# Altium footprint library PCB_Module.PcbLib: 31 footprints (part 1 of 2)
Each footprint in its own frame and in the unit in brackets; x right, y up, seen from the top. Pads: shape width x height; smd on the part's side, far side on the other; paste and mask are expansions set on the pad; w line width, h text height; cw(c..) or ccw(c..) is an arc to the next point about the centre after c.
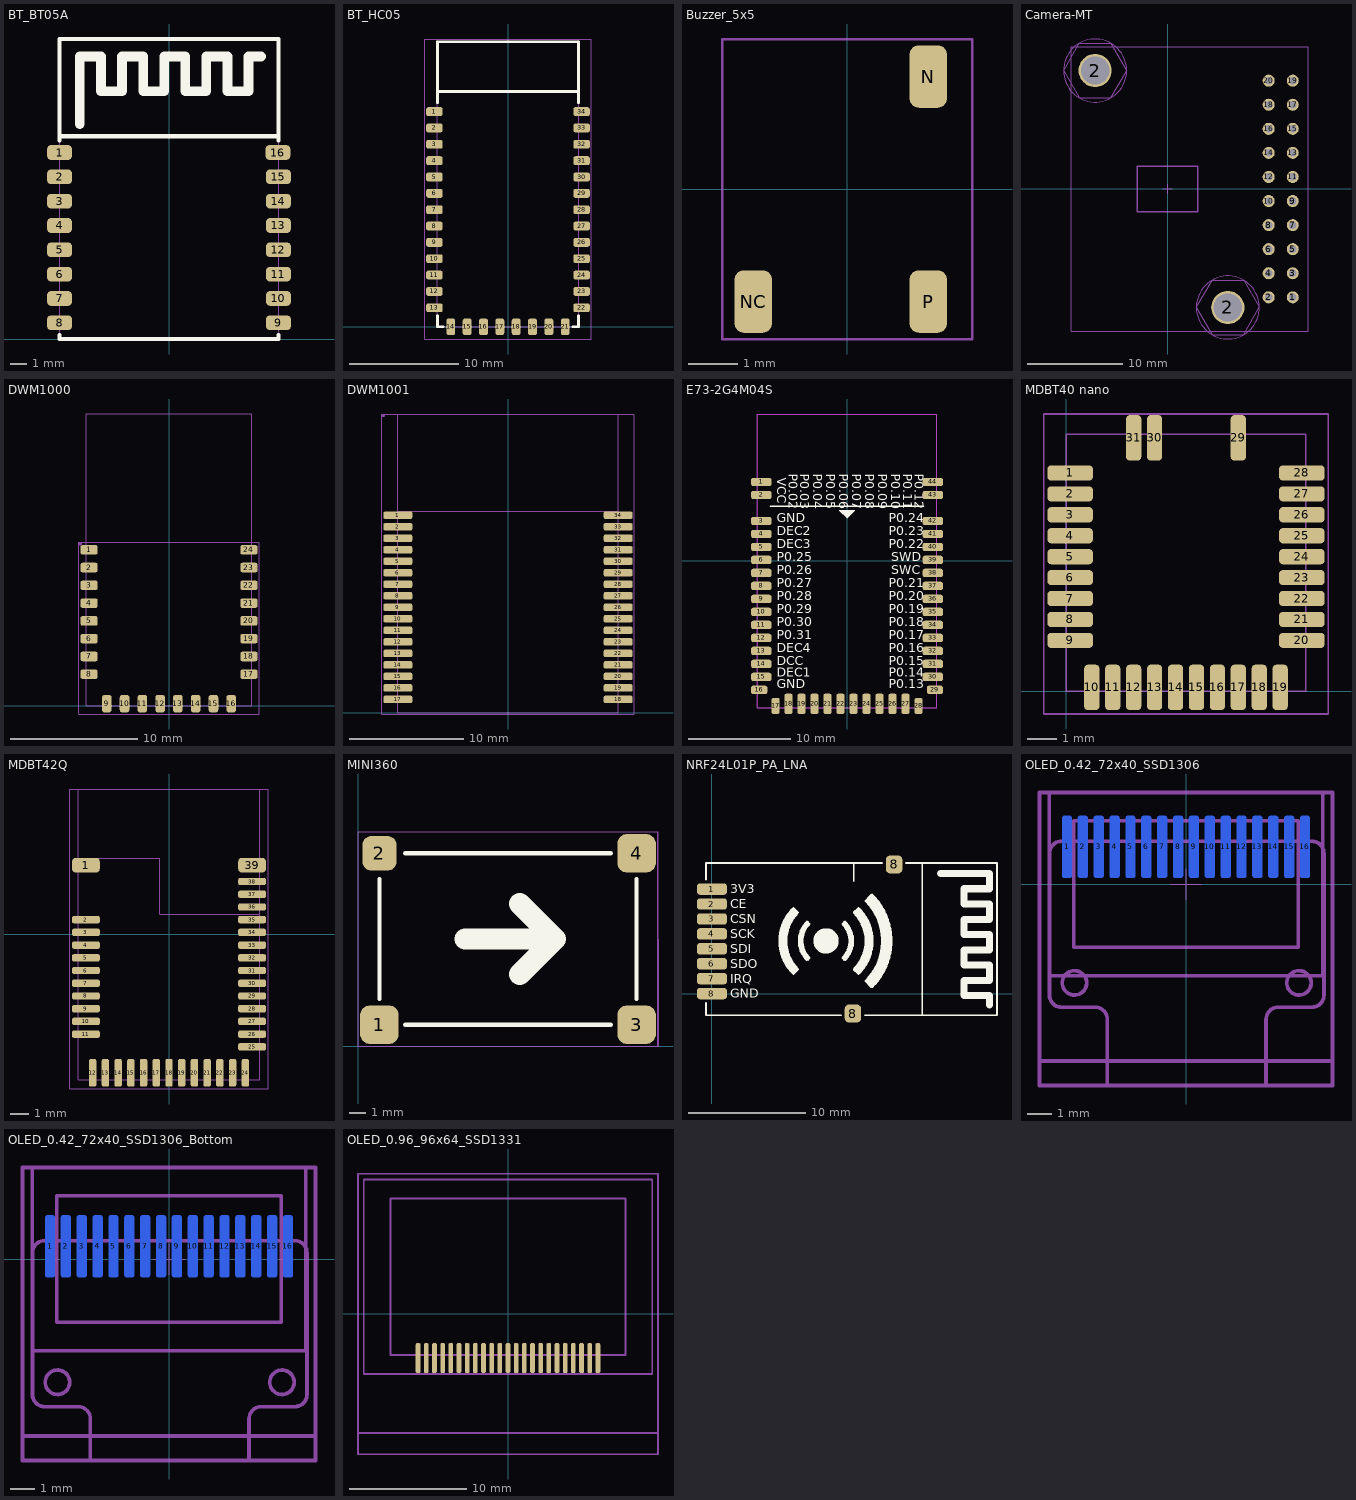
[diagram p0: the footprints below, top view; thin cyan lines are the x and y axes]

## BT_BT05A [mm]
pads (16):
  rrect50% 1.524x0.9 smd: 1(-6.754,11.5) 2(-6.754,10) 3(-6.754,8.5) 4(-6.754,7) 5(-6.754,5.5) 6(-6.754,4) 7(-6.754,2.5) 8(-6.754,1) 9(6.746,1) 10(6.746,2.5) 11(6.746,4) 12(6.746,5.5) 13(6.746,7) 14(6.746,8.5) 15(6.746,10) 16(6.712,11.5)
Top Overlay:
  lines w0.254: -6.75,0.25 -6.75,0 6.75,0 6.75,0.25 ; -6.75,12.25 -6.75,12.5 ; 6.75,12.25 6.75,12.5 ; -6.75,12.5 -6.75,18.5 6.75,18.5 6.75,12.5 ; -6.75,12.5 6.75,12.5
  lines w0.6: -5.5,13.25 -5.5,17.426 -4.2,17.426 -4.2,15.282 -2.9,15.282 -2.9,17.426 -1.6,17.426 -1.6,15.282 -0.3,15.282 -0.3,17.426 1,17.426 1,15.282 2.3,15.282 2.3,17.426 3.6,17.426 3.6,15.282 4.9,15.282 4.9,17.426 5.676,17.426
Mechanical 13:
  lines w0.051: -6.75,12.5 6.75,12.5 ; -6.75,0 6.75,0 6.75,18.5 -6.75,18.5 -6.75,0
T-Component:
  lines w0.051: -6.75,0 6.75,0 6.75,18.5 -6.75,18.5 -6.75,0
  text ".Designator" at -0.873,6.885 h1.27

## BT_HC05 [mil]
pads (34):
  rrect50% 60x32 smd: 1(-265.91,777.56) 2(-265.91,718.5) 3(-265.91,659.45) 4(-265.91,600.39) 5(-265.91,541.34) 6(-265.91,482.28) 7(-265.91,423.23) 8(-265.91,364.17) 9(-265.91,305.12) 10(-265.91,246.06) 11(-265.91,187.01) 12(-265.91,127.95) 13(-265.91,68.9) 22(265.91,68.9) 23(265.91,127.95) 24(265.91,187.01) 25(265.91,246.06) 26(265.91,305.12) 27(265.91,364.17) 28(265.91,423.23) 29(265.91,482.28) 30(265.91,541.34) 31(265.91,600.39) 32(265.91,659.45) 33(265.91,718.5) 34(265.91,777.56)
  rrect50% 32x60 smd: 14(-206.69,0) 15(-147.64,0) 16(-88.58,0) 17(-29.53,0) 18(29.53,0) 19(88.58,0) 20(147.64,0) 21(206.69,0)
Top Overlay:
  lines w10: -255,40 -255,0 -235,0 ; -255,810 -255,850 ; 235,0 255,0 255,40 ; 255,810 255,850 ; -255,850 -255,1030 255,1030 255,850 ; -255,850 255,850
Mechanical 13:
  lines w2: -255.91,850.39 255.91,850.39 ; -255.91,0 255.91,0 255.91,1039.37 -255.91,1039.37 -255.91,0
T-Component:
  lines w2: -300,-44 300,-44 300,1040 -300,1040 -300,-44
  text ".Designator" at -34.37,396.06 h50
3D body "User Library-Bluetooth HC-06_.STEP": height 92.52, standoff 0, extent -275.98,0 275.98,1102.76

## Buzzer_5x5 [mil]
pads (3):
  rrect50% 30x50 smd: N(65,90) NC(-75,-90) P(65,-90)
T-Component:
  lines w2: -100,-120 -100,120 100,120 100,-120 -100,-120
  text ".Designator" at -34.37,-3.94 h50
3D body "css-0575b-smt.stp": height 106.3, standoff 0, extent -98.44,-98.43 98.41,98.43

## Camera-MT [mil]
pads (22):
  round 50 hole 31: 1(520,-450) 2(420,-450) 3(520,-350) 4(420,-350) 5(520,-250) 6(420,-250) 7(520,-150) 8(420,-150) 9(520,-50) 10(420,-50) 11(520,50) 12(420,50) 13(520,150) 14(420,150) 15(520,250) 16(420,250) 17(520,350) 18(420,350) 19(520,450) 20(420,450)
  round 137.8 hole 118.11 mask+0: 2(-300.94,492.13) 2(250.24,-492.13)
Mechanical 13:
  circle w2: c-300.94,492.13 r130.98
  circle w2: c250.24,-492.13 r130.98
  lines w2: -19.69,0 19.68,0 ; 0,-19.69 0,19.68 ; -431.92,492.13 -366.43,605.55 -235.46,605.55 -169.97,492.12 -235.46,378.7 -366.43,378.7 -431.92,492.13 ; -399.37,-590.55 -399.37,590.55 584.88,590.55 584.88,-590.55 -399.37,-590.55 ; 119.26,-492.13 184.75,-378.7 315.72,-378.7 381.21,-492.13 315.72,-605.56 184.75,-605.56 119.26,-492.13
  lines w6: -126,-94 126,-94 126,94 -126,94 -126,-94
T-Component:
  text ".Designator" at -34.37,-3.94 h50
B-Component:
  lines w1: 510,-450 530,-450 ; 510,-350 530,-350 ; 510,-250 530,-250 ; 510,-150 530,-150 ; 510,-50 530,-50 ; 510,50 530,50 ; 510,150 530,150 ; 510,250 530,250 ; 510,350 530,350 ; 510,450 530,450 ; 520,-460 520,-440 ; 520,-360 520,-340 ; 520,-260 520,-240 ; 520,-160 520,-140 ; 520,-60 520,-40 ; 520,40 520,60 ; 520,140 520,160 ; 520,240 520,260 ; 520,340 520,360 ; 520,440 520,460
3D body "Camera-MT__Pcb.step": height 528.82, standoff 114.65, extent -399.36,-590.55 584.89,590.55
3D body "female_header_a-bl254-dg-g04d.stp": height 334.65, standoff -125.98, extent 371.57,-4.91 568.42,204.93
3D body "female_header_a-bl254-dg-g06d.stp": height 334.65, standoff -125.98, extent 371.57,195.08 568.42,504.93
3D body "female_header_a-bl254-dg-g06d.stp": height 334.65, standoff -125.98, extent 371.57,-304.92 568.42,4.93
3D body "female_header_a-bl254-dg-g04d.stp": height 334.65, standoff -125.98, extent 371.57,-504.91 568.42,-295.07

## DWM1000 [mil]
pads (24):
  rrect50% 54x30 smd: 1(-248,484.25) 2(-248,429.13) 3(-248,374.02) 4(-248,318.9) 5(-248,263.78) 6(-248,208.66) 7(-248,153.54) 8(-248,98.43) 17(248,98.43) 18(248,153.54) 19(248,208.66) 20(248,263.78) 21(248,318.9) 22(248,374.02) 23(248,429.13) 24(248,484.25)
  rrect50% 30x54 smd: 9(-192.91,7) 10(-137.8,7) 11(-82.68,7) 12(-27.56,7) 13(27.56,7) 14(82.68,7) 15(137.8,7) 16(192.91,7)
Mechanical 13:
  lines w1.97: -255.91,905.51 -255.91,0 255.91,0 255.91,905.51
  lines w2: -255.91,905.51 255.91,905.51
T-Component:
  region: -280,508 -270,508 -270,503 -270,502.01 -270.76,500.17 -272.17,498.76 -274.01,498 -275,498 -280,498
  lines w2: -280,-25 280,-25 280,508 -280,508 -280,-25
  text ".Designator" at -39.37,246.06 h50
3D body "DWM1000 Module.STEP": height 114.17, standoff -0.39, extent -255.9,0 255.9,905.51

## DWM1001 [mm]
pads (34):
  rrect50% 2.54x0.66 smd: 1(-9.65,17.294) 2(-9.65,16.285) 3(-9.65,15.276) 4(-9.65,14.267) 5(-9.65,13.258) 6(-9.65,12.249) 7(-9.65,11.24) 8(-9.65,10.231) 9(-9.65,9.222) 10(-9.65,8.213) 11(-9.65,7.204) 12(-9.65,6.195) 13(-9.65,5.186) 14(-9.65,4.177) 15(-9.65,3.168) 16(-9.65,2.159) 17(-9.65,1.15) 18(9.65,1.15) 19(9.65,2.159) 20(9.65,3.168) 21(9.65,4.177) 22(9.65,5.186) 23(9.65,6.195) 24(9.65,7.204) 25(9.65,8.213) 26(9.65,9.222) 27(9.65,10.231) 28(9.65,11.24) 29(9.65,12.249) 30(9.65,13.258) 31(9.65,14.267) 32(9.65,15.276) 33(9.65,16.285) 34(9.65,17.294)
Mechanical 13:
  lines w0.051: -9.65,17.653 9.65,17.653 ; -9.65,0 -9.65,26.13 9.65,26.13 9.65,0 -9.65,0
T-Component:
  region: -11.049,26.162 -10.795,26.162 -10.795,26.035 -10.795,26.01 -10.814,25.963 -10.85,25.927 -10.897,25.908 -10.922,25.908 -11.049,25.908
  lines w0.051: -11.049,-0.127 11.049,-0.127 11.049,26.162 -11.049,26.162 -11.049,-0.127
  text ".Designator" at -0.746,8.79 h1.27

## E73-2G4M04S [mil]
pads (44):
  rrect50% 78x32 smd: 1(-330,303.74) 2(-330,253.74) 3(-330,153.74) 4(-330,103.74) 5(-330,53.74) 6(-330,3.74) 7(-330,-46.26) 8(-330,-96.26) 9(-330,-146.26) 10(-330,-196.26) 11(-330,-246.26) 12(-330,-296.26) 13(-330,-346.26) 14(-330,-396.26) 15(-330,-446.26) 30(330,-446.26) 31(330,-396.26) 32(330,-346.26) 33(330,-296.26) 34(330,-246.26) 35(330,-196.26) 36(330,-146.26) 37(330,-96.26) 38(330,-46.26) 39(330,3.74) 40(330,53.74) 41(330,103.74) 42(330,153.74) 43(330,253.74) 44(330,303.74)
  rrect50% 62.99x32 smd: 16(-338,-496.26)
  rrect50% 32x62 smd: 17(-275,-558) 28(275,-558)
  rrect50% 32x78 smd: 18(-225,-550) 19(-175,-550) 20(-125,-550) 21(-75,-550) 22(-25,-550) 23(25,-550) 24(75,-550) 25(125,-550) 26(175,-550) 27(225,-550)
  rrect50% 62x32 smd: 29(338,-496.26)
Top Overlay:
  region: -30,195 30,195 0,165
  lines w2: -30,195 30,195 0,165 -30,195
  lines w6: -295,210 295,210
  text "P0.13" at 160,-502.26 h60
  text "P0.14" at 160,-457.26 h60
  text "P0.15" at 160,-412.26 h60
  text "P0.16" at 160,-362.26 h60
  text "P0.17" at 160,-312.26 h60
  text "P0.18" at 160,-262.26 h60
  text "P0.19" at 160,-212.26 h60
  text "P0.20" at 160,-162.26 h60
  text "P0.21" at 160,-112.26 h60
  text "SWC" at 170,-62.26 h60
  text "SWD" at 170,-12.26 h60
  text "P0.22" at 160,37.74 h60
  text "P0.23" at 160,87.74 h60
  text "P0.24" at 160,137.74 h60
  text "GND" at -270,-502.26 h60
  text "DEC1" at -270,-457.26 h60
  text "DCC" at -270,-412.26 h60
  text "DEC4" at -270,-362.26 h60
  text "P0.31" at -270,-312.26 h60
  text "P0.30" at -270,-262.26 h60
  text "P0.29" at -270,-212.26 h60
  text "P0.28" at -270,-162.26 h60
  text "P0.27" at -270,-112.26 h60
  text "P0.25" at -270,-12.26 h60
  text "DEC3" at -270,37.74 h60
  text "GND" at -270,137.74 h60
  text "DEC2" at -270,87.74 h60
  text "P0.26" at -270,-62.26 h60
  text "P0.02" at -236,335 h60
  text "P0.03" at -191,335 h60
  text "P0.04" at -141,335 h60
  text "P0.05" at -91,335 h60
  text "P0.06" at -41,335 h60
  text "P0.07" at 9,335 h60
  text "P0.08" at 59,335 h60
  text "P0.09" at 109,335 h60
  text "P0.10" at 159,335 h60
  text "P0.11" at 204,335 h60
  text "VCC" at -281,320 h60
  text "P0.12" at 249,335 h60
Keep-Out Layer:
  lines w3.94: -344.49,-564.96 -344.49,564.96 344.49,564.96 344.49,-564.96 -344.49,-564.96
Mechanical 13:
  lines w2: -345,-565 345,-565 345,565 -345,565 -345,-565
T-Component:
  lines w2: -345,-565 -345,565 345,565 345,-565 -345,-565
  text ".Designator" at -40,-5 h50

## ESP03 [mil]
3D body "User Library-ESP-03.STEP": height 91.34, standoff -44.09, extent -1.97,0 482.28,681.1

## ESP07 [mil]
3D body "User Library-WiFi ESP8266.STEP": height 141.73, standoff -1.97, extent 19.69,19.69 649.61,854.34

## MDBT40 nano [mil]
pads (31):
  rrect50% 60x20 smd: 1(5,287.4) 2(5,259.84) 3(5,232.28) 4(5,204.72) 5(5,177.17) 6(5,149.61) 7(5,122.05) 8(5,94.49) 9(5,66.93) 20(310,66.93) 21(310,94.49) 22(310,122.05) 23(310,149.61) 24(310,177.17) 25(310,204.72) 26(310,232.28) 27(310,259.84) 28(310,287.4)
  rrect50% 20x60 smd: 10(33.46,5) 11(61.02,5) 12(88.58,5) 13(116.14,5) 14(143.7,5) 15(171.26,5) 16(198.82,5) 17(226.38,5) 18(253.94,5) 19(281.5,5) 29(226.38,333.58) 30(116.14,333.58) 31(88.58,333.58)
Mechanical 13:
  lines w2: 0,0 314.96,0 314.96,338.58 0,338.58 0,0
T-Component:
  lines w2: -30,-30 -30,365 345,365 345,-30 -30,-30
  text ".Designator" at 125.63,171.06 h50

## MDBT42Q [mil]
pads (39):
  rrect50% 60x32 smd: 1(-180,150) 39(180,150)
  rrect50% 60x16 smd: 2(-180,31.89) 3(-180,4.33) 4(-180,-23.23) 5(-180,-50.79) 6(-180,-78.35) 7(-180,-105.91) 8(-180,-133.46) 9(-180,-161.02) 10(-180,-188.58) 11(-180,-216.14) 25(180,-243.7) 26(180,-216.14) 27(180,-188.58) 28(180,-161.02) 29(180,-133.47) 30(180,-105.91) 31(180,-78.35) 32(180,-50.79) 33(180,-23.23) 34(180,4.33) 35(180,31.89) 36(180,59.45) 37(180,87.01) 38(180,114.57)
  rrect50% 16x60 smd: 12(-165.35,-300) 13(-137.8,-300) 14(-110.24,-300) 15(-82.68,-300) 16(-55.12,-300) 17(-27.56,-300) 18(0,-300) 19(27.56,-300) 20(55.12,-300) 21(82.68,-300) 22(110.24,-300) 23(137.8,-300) 24(165.35,-300)
Mechanical 13:
  lines w2: -196.85,165.39 -19.68,165.39 -19.68,43.35 196.85,43.35 ; -196.85,314.92 -196.85,-315 196.85,-315 ; -196.85,315 196.85,315 196.85,-314.92
T-Component:
  lines w2: -215,-335 -215,315 215,315 215,-335 -215,-335
  text ".Designator" at -65,-75 h150

## MINI360 [mil]
pads (4):
  rrect50% 90x90 smd: 1(50,50) 3(650,50) 4(650,450)
  rrect50% 80x80 smd: 2(50,450)
Top Overlay:
  lines w10: 50,110 50,390 ; 110,50 590,50 ; 110,450 590,450 ; 650,110 650,390
  lines w50: 250,250 460,250 ; 377.5,167.5 460,250 ; 377.5,332.5 460,250
Mechanical 13:
  lines w2: 0,0 0,500 700,500 700,0 0,0
T-Component:
  lines w2: 0,0 0,500 700,500 700,0 0,0
  text ".Designator" at 315.63,246.06 h50

## NRF24L01P_PA_LNA [mil]
pads (10):
  rrect50% 100x38 smd: 1(0,350) 2(0,300) 3(0,250) 4(0,200) 5(0,150) 6(0,100) 7(0,50) 8(0,0)
  rrect50% 55x60 smd: 8(472.44,-66.93) 8(610.24,432.68)
Top Overlay:
  circle w45: c382,176.4 r20
  lines w6: -20,-31.5 -20,-72.6 433.07,-72.6 ; -20,381.89 -20,437.4 570.87,437.4 ; 474.84,377.4 474.84,437.4 ; 511.81,-72.6 955,-72.6 955,437.4 649.61,437.4 ; 704.92,-72.6 704.92,437.4
  lines w10: 266.5,73.9 273,67.4 287,81.4 282,86.4 ; 267,279.4 273,285.4 287,271.4 282,266.4 ; 314,118.4 319,113.4 325,119.4 320,124.4 ; 314,234.4 319,239.4 325,233.4 320,228.4 ; 444,124.4 439,119.4 445,113.4 450,118.4 ; 444,228.4 439,233.4 445,239.4 450,234.4 ; 482,86.4 477,81.4 491,67.4 497,73.4 ; 482,266.4 477,271.4 491,285.4 497.5,278.9 ; 525.5,51.9 516,42.4 535.5,22.9 545,32.4 ; 526,300.4 516,310.4 535.5,329.9 544.5,320.9
  lines w19: 318.58,120.03 cw(c382,176.4) 318.63,232.84 ; 445.37,119.97 ccw(c382,176.4) 445.42,232.77
  lines w23.62: 765,402.4 929.41,402.4 929.41,351.22 845,351.22 845,300.04 929.41,300.04 929.41,248.86 845,248.86 845,197.68 929.41,197.68 929.41,146.5 845,146.5 845,95.31 929.41,95.31 929.41,44.13 845,44.13 845,-7.05 929.41,-7.05 929.41,-37.6
  lines w30: 272.76,82.2 cw(c382,176.4) 272.76,270.61 ; 491.24,82.2 ccw(c382,176.4) 491.24,270.61
  lines w38: 535.57,42.65 ccw(c382,176.4) 535.57,310.15
  text "GND" at 61,-14.6 h30
  text "IRQ" at 61,35.4 h30
  text "SDO" at 61,85.4 h30
  text "SDI" at 61,135.4 h30
  text "SCK" at 61,185.4 h30
  text "CSN" at 61,235.4 h30
  text "3V3" at 61,335.4 h30
  text "CE" at 61,285.4 h30
T-Component:
  text ".Designator" at 187.01,177.17 h50
3D body "RF.step": height 46.5, standoff -0.8, extent -15,-67.6 950,432.4

## OLED_0.42_72x40_SSD1306 [mil]
pads (16):
  rrect50% 16x100 smd far side: 1(-191.93,60) 2(-166.34,60) 3(-140.75,60) 4(-115.16,60) 5(-89.57,60) 6(-63.98,60) 7(-38.39,60) 8(-12.8,60) 9(12.8,60) 10(38.39,60) 11(63.98,60) 12(89.57,60) 13(115.16,60) 14(140.75,60) 15(166.34,60) 16(191.93,60)
Mechanical 13:
  circle w5.98: c182.18,-159.28 r19.68
  circle w5.98: c-179.87,-159.28 r19.68
  lines w5.98: -220.3,-178.96 ccw(c-200.62,-178.96) -200.62,-198.65 -146.48,-198.65 cw(c-146.48,-218.33) -126.8,-218.33 -126.8,-324.8 ; -220.3,49.38 cw(c-200.62,49.38) -200.62,69.07 ; 129.11,-324.8 129.11,-218.33 cw(c148.79,-218.33) 148.79,-198.65 202.93,-198.65 ccw(c202.93,-178.96) 222.61,-178.96 ; 202.93,69.07 cw(c202.93,49.38) 222.61,49.38
  lines w6: -220.3,-178.96 -220.3,49.38 ; -200.62,69.07 202.93,69.07 ; 222.61,-178.96 222.61,49.38 ; -236.22,-285.43 -236.22,-324.8 236.22,-324.8 236.22,-285.43 ; -236.22,-285.43 -236.22,147.64 236.22,147.64 236.22,-285.43 ; -236.22,-285.43 236.22,-285.43 ; -220.47,-147.64 220.47,-147.64 220.47,147.64 -220.47,147.64 -220.47,-147.64 ; -181.02,-101.97 181.02,-101.97 181.02,101.97 -181.02,101.97 -181.02,-101.97
T-Component:
  lines w2: -25,0 25,0 ; 0,-25 0,25
3D body: height 39.37, standoff 0, extent -236.22,-285.43 236.22,-147.64
3D body: height 39.37, standoff 0, extent -236.22,-147.64 236.22,147.64
3D body: height 43.31, standoff 3.94, extent -181.02,-101.97 181.02,101.97

## OLED_0.42_72x40_SSD1306_Bottom [mil]
pads (16):
  rrect50% 16x100 smd far side: 1(-191.93,20.63) 2(-166.34,20.63) 3(-140.75,20.63) 4(-115.16,20.63) 5(-89.57,20.63) 6(-63.98,20.63) 7(-38.39,20.63) 8(-12.8,20.63) 9(12.8,20.63) 10(38.39,20.63) 11(63.98,20.63) 12(89.57,20.63) 13(115.16,20.63) 14(140.75,20.63) 15(166.34,20.63) 16(191.93,20.63)
Mechanical 13:
  circle w5.98: c-179.87,-198.65 r19.68
  circle w5.98: c182.18,-198.65 r19.68
  lines w5.98: -220.3,-218.33 ccw(c-200.62,-218.33) -200.62,-238.02 -146.48,-238.02 cw(c-146.48,-257.7) -126.8,-257.7 -126.8,-324.8 ; -220.3,10.01 cw(c-200.62,10.01) -200.62,29.7 ; 129.11,-324.8 129.11,-257.7 cw(c148.79,-257.7) 148.79,-238.02 202.93,-238.02 ccw(c202.93,-218.33) 222.61,-218.33 ; 202.93,29.7 cw(c202.93,10.01) 222.61,10.01
  lines w6: -220.3,-218.33 -220.3,10.01 ; -200.62,29.7 202.93,29.7 ; 222.61,-218.33 222.61,10.01 ; -236.22,-285.43 236.22,-285.43 ; -236.22,-285.43 -236.22,147.64 236.22,147.64 236.22,-285.43 ; -236.22,-285.43 -236.22,-324.8 236.22,-324.8 236.22,-285.43 ; -220.47,-147.64 -220.47,147.64 220.47,147.64 220.47,-147.64 -220.47,-147.64 ; -181.02,-101.97 -181.02,101.97 181.02,101.97 181.02,-101.97 -181.02,-101.97
T-Component:
  lines w2: -25,0 25,0 ; 0,-25 0,25
3D body: height 82.68, standoff 43.31, extent -181.02,-101.97 181.02,101.97
3D body: height 78.74, standoff 39.37, extent -236.22,-147.64 236.22,147.64
3D body: height 78.74, standoff 39.37, extent -236.22,-285.43 236.22,-147.64

## OLED_0.96_96x64_SSD1331 [mil]
pads (23):
  rrect50% 16x100 smd: 1(303.15,-150) 2(275.59,-150) 3(248.03,-150) 4(220.47,-150) 5(192.91,-150) 6(165.35,-150) 7(137.8,-150) 8(110.24,-150) 9(82.68,-150) 10(55.12,-150) 11(27.56,-150) 12(0,-150) 13(-27.56,-150) 14(-55.12,-150) 15(-82.68,-150) 16(-110.24,-150) 17(-137.8,-150) 18(-165.35,-150) 19(-192.91,-150) 20(-220.47,-150) 21(-248.03,-150) 22(-275.59,-150) 23(-303.15,-150)
Mechanical 13:
  lines w6: -505.91,-402.4 -505.91,-474.45 505.91,-474.45 505.91,-402.4 ; -505.91,-402.4 -505.91,471.61 505.91,471.61 505.91,-402.4 ; -505.91,-402.4 505.91,-402.4 ; -486.22,-203.58 -486.22,451.93 486.22,451.93 486.22,-203.58 -486.22,-203.58 ; -396.46,-140 396.46,-140 396.46,388.35 -396.46,388.35 -396.46,-140
3D body "User Library-096OLED.STEP": height 24.42, standoff -126.58, extent -525.58,-398.28 525.6,476.38